# Altium footprint library aeronist-Footprint-Lib.PcbLib: 67 footprints (part 4 of 5)
Each footprint in its own frame and in the unit in brackets; x right, y up, seen from the top. Pads: shape width x height; smd on the part's side, far side on the other; paste and mask are expansions set on the pad; w line width, h text height; cw(c..) or ccw(c..) is an arc to the next point about the centre after c.
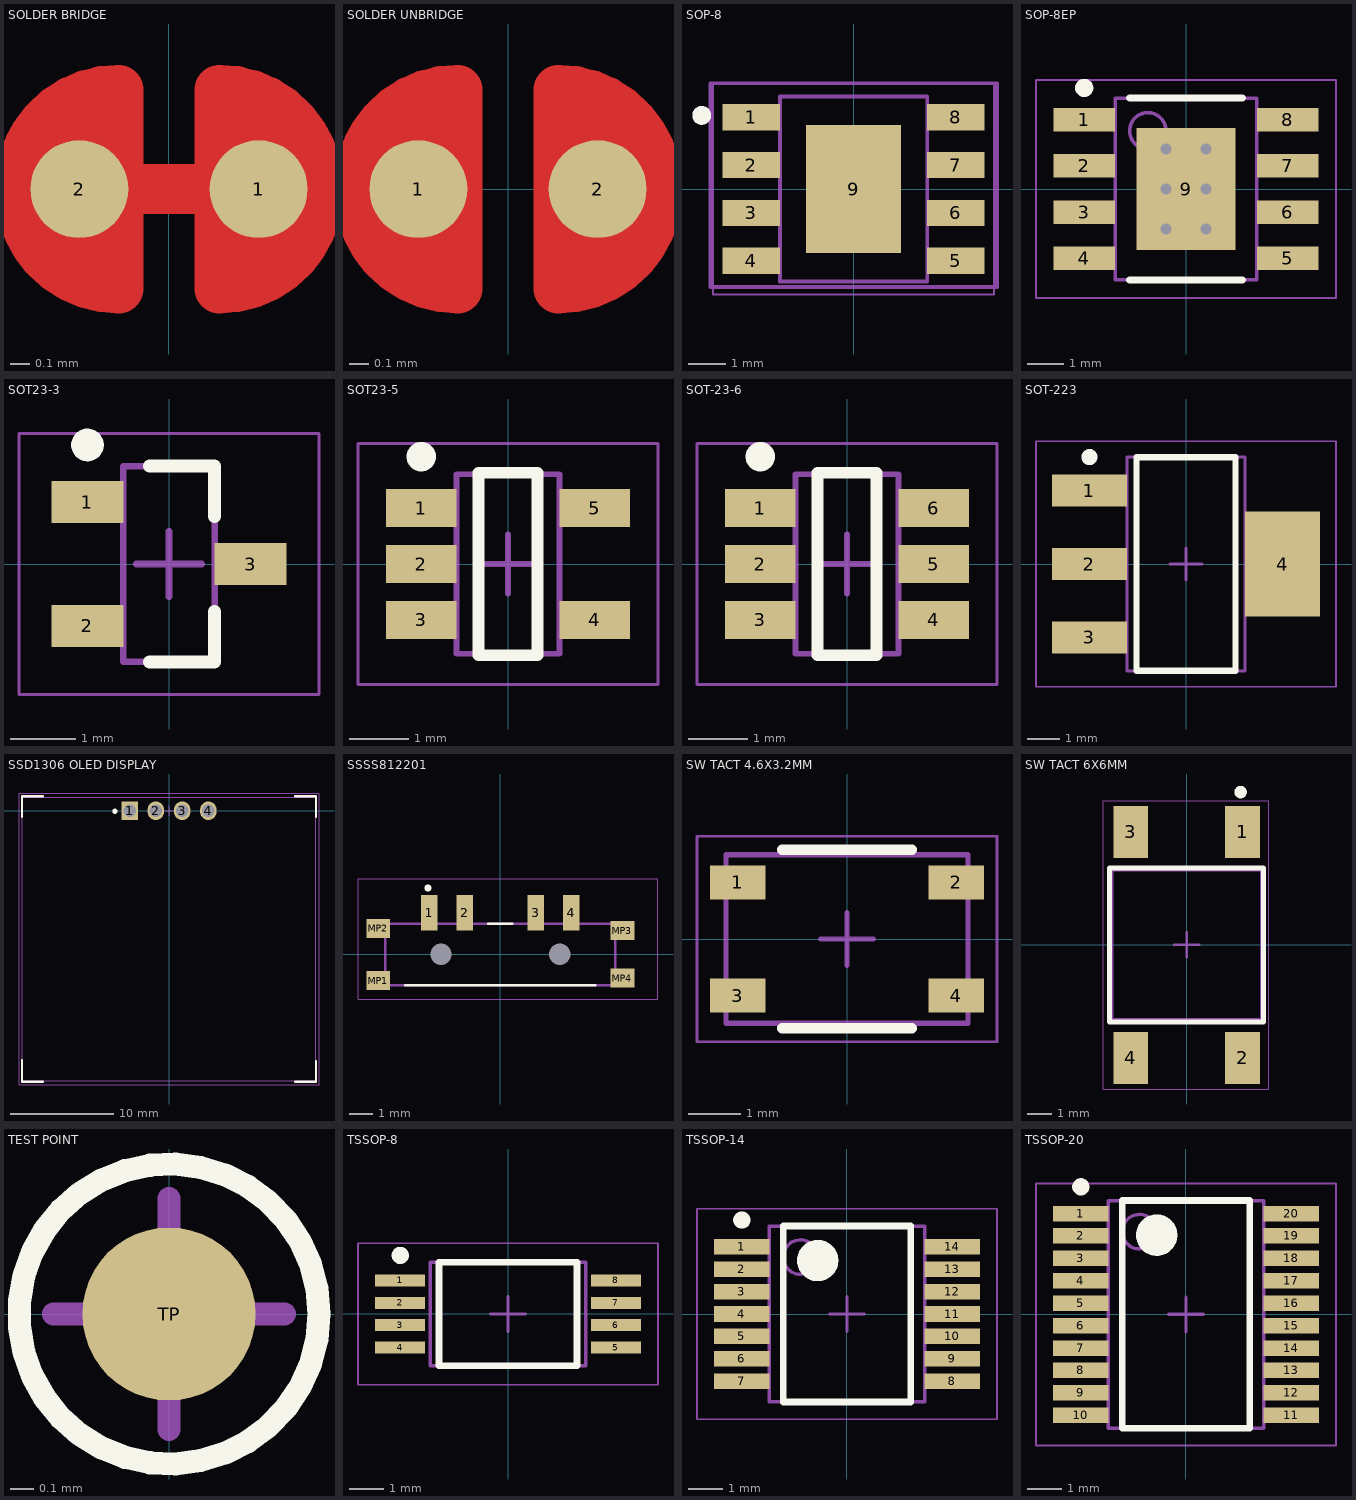
[diagram p3: the footprints below, top view; thin cyan lines are the x and y axes]

## SOLDER BRIDGE [mm] "Bridged PCB jumper footprint"
pads (2):
  round 0.5 smd mask+0: 1(0.458,0) 2(-0.458,0)
Top Layer:
  region: 0.258,0.5 0.45,0.5 0.758,0.25 0.758,-0.2 0.45,-0.508 0.258,-0.508
  region: -0.258,-0.504 -0.45,-0.504 -0.758,-0.254 -0.758,0.196 -0.45,0.504 -0.258,0.504
  lines w0.254: -0.458,0 0.458,0 ; -0.258,-0.508 cw(c-0.258,0) -0.258,0.508 -0.258,-0.508 ; 0.258,-0.508 ccw(c0.258,0) 0.258,0.508 0.258,-0.508
Top Solder:
  circle w0.737: c0.258,0 r0.279
  circle w0.737: c-0.258,0 r0.279
  lines w0.254: -0.279,-0.521 0.233,-0.521 ; -0.262,0.522 0.25,0.522

## SOLDER UNBRIDGE [mm] "Unbridged PCB jumper footprint"
pads (2):
  round 0.5 smd mask+0: 1(-0.458,0) 2(0.458,0)
Top Layer:
  region: -0.258,-0.504 -0.45,-0.504 -0.758,-0.254 -0.758,0.196 -0.45,0.504 -0.258,0.504
  region: 0.258,0.5 0.45,0.5 0.758,0.25 0.758,-0.2 0.45,-0.508 0.258,-0.508
  lines w0.254: -0.258,-0.508 cw(c-0.258,0) -0.258,0.508 -0.258,-0.508 ; 0.258,-0.508 ccw(c0.258,0) 0.258,0.508 0.258,-0.508
Top Solder:
  circle w0.737: c-0.258,0 r0.279
  circle w0.737: c0.258,0 r0.279
  lines w0.254: -0.279,-0.521 0.233,-0.521 ; -0.262,0.522 0.25,0.522

## SOP-8 [mm] "SOP-8, 8-Leads, Body 4.90x3.90mm, Pitch 1.27mm, IPC Low Density."
pads (9):
  rect 1.525x0.7 smd: 1(-2.712,1.905) 2(-2.712,0.635) 3(-2.712,-0.635) 4(-2.712,-1.905) 5(2.712,-1.905) 6(2.712,-0.635) 7(2.712,0.635) 8(2.712,1.905)
  rect 2.513x3.402 smd: 9(0,0)
Top Overlay:
  circle w0.25: c-4.025,1.95 r0.125
Top Assembly:
  lines w0.1: -1.95,-2.45 -1.95,2.45 1.95,2.45 1.95,-2.45 -1.95,-2.45
Top Courtyard:
  lines w0.1: -0.475,0 0.475,0 ; 0,-0.475 0,0.475 ; -3.8,-2.6 -3.8,2.8 3.8,2.8 3.8,-2.6 -3.8,-2.6
Mechanical 20:
  lines w0.05: -3.725,-2.8 3.725,-2.8 3.725,2.8 -3.725,2.8 -3.725,-2.8
3D body "SOP-8.stp": height 1.75, standoff 0, extent -3,-2.4 3,2.5

## SOP-8EP [mm] "SOP-8EP, 8-Leads, Body 4,90x3,85mm, Pitch 1,27mm, Thermal Pad 3,35x2,71mm, IPC Low Density"
height 1.5
pads (9):
  rect 1.7x0.65 smd: 1(-2.8,1.905) 2(-2.8,0.635) 3(-2.8,-0.635) 4(-2.8,-1.905) 5(2.8,-1.905) 6(2.8,-0.635) 7(2.8,0.635) 8(2.8,1.905)
  rect 2.71x3.35 smd: 9(0,0)
via 0.55,-1.1 diameter 0.6 hole 0.3
via -0.55,-1.1 diameter 0.6 hole 0.3
via 0.55,0 diameter 0.6 hole 0.3
via -0.55,0 diameter 0.6 hole 0.3
via 0.55,1.1 diameter 0.6 hole 0.3
via -0.55,1.1 diameter 0.6 hole 0.3
Top Overlay:
  circle w0.25: c-2.8,2.78 r0.125
  lines w0.2: -1.55,-2.5 1.55,-2.5 ; -1.55,2.5 1.55,2.5
Top Assembly:
  circle w0.1: c-1.05,1.6 r0.5
  lines w0.1: -1.95,-2.5 1.95,-2.5 1.95,2.5 -1.95,2.5 -1.95,-2.5
Top Courtyard:
  lines w0.05: -4.125,-3 4.125,-3 4.125,3 -4.125,3 -4.125,-3
  lines w0.1: -0.5,0 0.5,0 ; 0,-0.5 0,0.5
3D body "SOP-8EP.step": height 1.5, standoff 0, extent -3,-2.5 3,2.5

## SOT23-3 [mm] "SOT23, 3-Leads, Body 2,90x2,30mm, Pitch 0,95mm, IPC Low Density"
height 1.1
pads (3):
  rect 1.1x0.65 smd: 1(-1.25,0.95) 2(-1.25,-0.95) 3(1.25,0)
Top Overlay:
  circle w0.25: c-1.25,1.825 r0.125
  lines w0.2: -0.3,-1.5 0.7,-1.5 0.7,-0.725 ; -0.3,1.5 0.7,1.5 0.7,0.725
Top Assembly:
  lines w0.1: -0.7,-1.5 -0.7,1.5 0.7,1.5 0.7,-1.5 -0.7,-1.5
Top Courtyard:
  lines w0.05: -2.3,-2 -2.3,2 2.3,2 2.3,-2 -2.3,-2
  lines w0.1: -0.5,0 0.5,0 ; 0,-0.5 0,0.5
3D body "SOT23-3.step": height 1.1, standoff 0, extent -1.3,-1.5 1.3,1.5

## SOT23-5 [mm] "SOT23, 5-Leads, Body 2,90x2,80mm, Pitch 0,95mm, IPC Low Density"
height 1.45
pads (5):
  rect 1.2x0.65 smd: 1(-1.475,0.95) 2(-1.475,0) 3(-1.475,-0.95) 4(1.475,-0.95) 5(1.475,0.95)
Top Overlay:
  circle w0.25: c-1.475,1.825 r0.125
  lines w0.2: -0.5,-1.55 -0.5,1.55 0.5,1.55 0.5,-1.55 -0.5,-1.55
Top Assembly:
  lines w0.1: -0.875,-1.525 0.875,-1.525 0.875,1.525 -0.875,1.525 -0.875,-1.525
Top Courtyard:
  lines w0.05: -2.55,-2.05 2.55,-2.05 2.55,2.05 -2.55,2.05 -2.55,-2.05
  lines w0.1: -0.5,0 0.5,0 ; 0,-0.5 0,0.5
3D body "SOT23-5.step": height 1.45, standoff 0, extent -1.5,-1.525 1.5,1.525

## SOT-23-6 [mm] "SOP-8, 8-Leads, Body 4.90x3.90mm, Pitch 1.27mm, IPC Low Density."
height 1.1
pads (6):
  rect 1.2x0.65 smd: 1(-1.475,0.95) 2(-1.475,0) 3(-1.475,-0.95) 4(1.475,-0.95) 5(1.475,0) 6(1.475,0.95)
Top Overlay:
  circle w0.25: c-1.475,1.825 r0.125
  lines w0.2: -0.5,-1.55 -0.5,1.55 0.5,1.55 0.5,-1.55 -0.5,-1.55
Top Assembly:
  lines w0.1: -0.875,-1.525 0.875,-1.525 0.875,1.525 -0.875,1.525 -0.875,-1.525
Top Courtyard:
  lines w0.05: -2.55,-2.05 2.55,-2.05 2.55,2.05 -2.55,2.05 -2.55,-2.05
  lines w0.1: -0.5,0 0.5,0 ; 0,-0.5 0,0.5
3D body "SOT-23-6.step": height 1.1, standoff 0, extent -1.5,-1.525 1.5,1.525

## SOT-223 [mm] "SOT223, 4-Leads, Body 6,50x7,00mm (avg), Pitch 2,30mm, IPC Low Density"
height 1.8
pads (4):
  rect 2.35x1 smd: 1(-3.025,2.3) 2(-3.025,0) 3(-3.025,-2.3)
  rect 2.35x3.3 smd: 4(3.025,0)
Top Overlay:
  circle w0.25: c-3.025,3.35 r0.125
  lines w0.2: -1.55,-3.35 -1.55,3.35 1.55,3.35 1.55,-3.35 -1.55,-3.35
Top Assembly:
  lines w0.1: -1.85,-3.35 -1.85,3.35 1.85,3.35 1.85,-3.35 -1.85,-3.35
Top Courtyard:
  lines w0.05: -4.7,-3.85 -4.7,3.85 4.7,3.85 4.7,-3.85 -4.7,-3.85
  lines w0.1: -0.5,0 0.5,0 ; 0,-0.5 0,0.5
3D body "SOT-223.step": height 1.8, standoff 0, extent -3.5,-3.35 3.5,3.35

## SSD1306 OLED DISPLAY [mm] "0.96\" 128×64 blue OLED module with SSD1306 controller, I²C interface (4-pin), 3.3–5 V compatible."
pads (4):
  rect 1.6x1.8 hole 1.2: 1(-3.81,0)
  oval 1.6x1.8 hole 1.2: 2(-1.27,0) 3(1.27,0) 4(3.81,0)
Top Overlay:
  circle w0.25: c-5.225,-0.05 r0.125
  lines w0.2: -14.2,-24.1 -14.2,-26.2 -12.2,-26.2 ; -14.2,-0.6 -14.2,1.4 -12.2,1.4 ; 12.2,-26.2 14.2,-26.2 14.2,-24.2 ; 12.2,1.4 14.2,1.4 14.2,-0.6
Top Assembly:
  lines w0.1: -14.2,-26.1 -14.2,1.3 14.2,1.3 14.2,-26.1 -14.2,-26.1
Top Courtyard:
  lines w0.05: -14.5,-26.5 14.5,-26.5 14.5,1.7 -14.5,1.7 -14.5,-26.5
  lines w0.1: -0.5,0 0.5,0 ; 0,-0.5 0,0.5
3D body "Pantalla OLED 0.96'' 128x64.stp": height 5.55, standoff -5.45, extent -14.2,-26.1 14.2,1.3

## SSSS812201 [mm] "Switch, Slide, SPDT (1P2T), 0.1A 12V, Surface Mount, Right Angle (Side Actuated), ALPS SSSS8 Series"
pads (10):
  rect 0.7x1.5 smd: 1(-3,1.75) 2(-1.5,1.75) 3(1.5,1.75) 4(3,1.75)
  round 0.45 hole 0.9 unplated: MH1(-2.5,0) MH2(2.5,0)
  rect 1x0.8 smd: MP1(-5.15,-1.1) MP2(-5.15,1.1) MP3(5.15,1) MP4(5.15,-1)
Top Overlay:
  lines w0.1: -0.65,-1.3 0.65,-1.3 ; -4,-1.3 4,-1.3 -4,-1.3 ; -0.5,1.3 0.5,1.3 -0.5,1.3
  lines w0.2: -3.1,2.8 ccw(c-3.05,2.8) -3,2.8 ; -3.1,2.8 cw(c-3.05,2.8) -3,2.8 ; -3.1,2.8 ccw(c-3.05,2.8) -3,2.8
Top Assembly:
  lines w0.1: -0.65,-1.3 0.65,-1.3 ; -4.85,-1.3 4.85,-1.3 4.85,1.3 -4.85,1.3 -4.85,-1.3
Top Courtyard:
  lines w0.05: -6,-1.9 -6,3.2 6.65,3.2 6.65,-1.9 -6,-1.9
3D body "SSSS812201.stp": height 1.4, standoff -0.5, extent -5.35,-2.8 5.35,2.2

## SW TACT 4.6X3.2MM [mm]
pads (4):
  rect 1.05x0.65 smd: 1(-2.075,1.075) 2(2.075,1.075) 3(-2.075,-1.075) 4(2.075,-1.075)
Top Overlay:
  lines w0.2: -1.23,-1.7 1.23,-1.7 ; -1.23,1.7 1.23,1.7
Top Assembly:
  lines w0.1: -2.3,-1.6 -2.3,1.6 2.3,1.6 2.3,-1.6 -2.3,-1.6
Top Courtyard:
  lines w0.05: -2.85,-1.95 2.85,-1.95 2.85,1.95 -2.85,1.95 -2.85,-1.95
  lines w0.1: -0.5,0 0.5,0 ; 0,-0.5 0,0.5
3D body "SKRPANE010.stp": height 2.5, standoff 0, extent -2.3,-1.6 2.3,1.6

## SW TACT 6X6MM [mm] "6×6 mm SMD tactile switch, 4 pads"
pads (4):
  rect 1.4x2.1 smd: 1(2.25,4.55) 2(2.25,-4.55) 3(-2.25,4.55) 4(-2.25,-4.55)
Top Overlay:
  circle w0.25: c2.175,6.15 r0.125
  lines w0.2: -3.1,-3.1 -3.1,3.1 3.1,3.1 3.1,-3.1 -3.1,-3.1
Top Assembly:
  lines w0.1: -3,-3 3,-3 3,3 -3,3 -3,-3
Top Courtyard:
  lines w0.05: -3.35,-5.8 -3.35,5.8 3.3,5.8 3.3,-5.8 -3.35,-5.8
  lines w0.1: -0.5,0 0.5,0 ; 0,-0.5 0,0.5
3D body "FSM4JSMATR.stp": height 5.13, standoff 0, extent -3,-5 3,5

## TEST POINT [mm] "Test Point, PCB Pad Only, Ø1.2mm"
pads (1):
  round 0.75 smd paste-0.6: TP(0,0)
Top Overlay:
  circle w0.1: c0,0 r0.65
Top Courtyard:
  lines w0.1: -0.5,0 0.5,0 ; 0,-0.5 0,0.5
3D body: height 0.03, standoff 0, extent -0.375,-0.375 0.375,0.375

## TSSOP-8 [mm] "TSSOP, 8-Leads, Body 2,93x4,40mm, Pitch 0,65mm, IPC Low Density"
height 1.2
pads (8):
  rect 1.45x0.35 smd: 1(-3.125,0.975) 2(-3.125,0.325) 3(-3.125,-0.325) 4(-3.125,-0.975) 5(3.125,-0.975) 6(3.125,-0.325) 7(3.125,0.325) 8(3.125,0.975)
Top Overlay:
  circle w0.25: c-3.125,1.7 r0.125
  lines w0.2: -2,-1.5 2,-1.5 2,1.5 -2,1.5 -2,-1.5
Top Assembly:
  lines w0.1: -2.25,-1.5 2.25,-1.5 2.25,1.5 -2.25,1.5 -2.25,-1.5
Top Courtyard:
  lines w0.05: -4.35,-2.05 4.35,-2.05 4.35,2.05 -4.35,2.05 -4.35,-2.05
  lines w0.1: -0.5,0 0.5,0 ; 0,-0.5 0,0.5
3D body "TSSOP-8.STEP": height 1.2, standoff 0, extent -3.2,-1.465 3.2,1.465

## TSSOP-14 [mm] "TSSOP-14, 14-Leads, Body 5,00x4,40mm, Pitch 0,65mm, IPC Low Density"
height 1.2
pads (14):
  rect 1.6x0.45 smd: 1(-3.05,1.95) 2(-3.05,1.3) 3(-3.05,0.65) 4(-3.05,0) 5(-3.05,-0.65) 6(-3.05,-1.3) 7(-3.05,-1.95) 8(3.05,-1.95) 9(3.05,-1.3) 10(3.05,-0.65) 11(3.05,0) 12(3.05,0.65) 13(3.05,1.3) 14(3.05,1.95)
Top Overlay:
  circle w0.6: c-0.85,1.55 r0.3
  circle w0.25: c-3.05,2.725 r0.125
  lines w0.2: -1.85,-2.55 1.85,-2.55 1.85,2.55 -1.85,2.55 -1.85,-2.55
Top Assembly:
  circle w0.1: c-1.35,1.65 r0.5
  lines w0.1: -2.25,-2.55 2.25,-2.55 2.25,2.55 -2.25,2.55 -2.25,-2.55
Top Courtyard:
  lines w0.05: -4.35,-3.05 4.35,-3.05 4.35,3.05 -4.35,3.05 -4.35,-3.05
  lines w0.1: -0.5,0 0.5,0 ; 0,-0.5 0,0.5
3D body "TSSOP14.step": height 1.2, standoff 0, extent -3.2,-2.55 3.2,2.55

## TSSOP-20 [mm] "TSSOP, 20-Leads, Body 6,50x4,40mm, Pitch 0,65mm, IPC Low Density"
height 1.2
pads (20):
  rect 1.6x0.45 smd: 1(-3.05,2.925) 2(-3.05,2.275) 3(-3.05,1.625) 4(-3.05,0.975) 5(-3.05,0.325) 6(-3.05,-0.325) 7(-3.05,-0.975) 8(-3.05,-1.625) 9(-3.05,-2.275) 10(-3.05,-2.925) 11(3.05,-2.925) 12(3.05,-2.275) 13(3.05,-1.625) 14(3.05,-0.975) 15(3.05,-0.325) 16(3.05,0.325) 17(3.05,0.975) 18(3.05,1.625) 19(3.05,2.275) 20(3.05,2.925)
Top Overlay:
  circle w0.6: c-0.85,2.3 r0.3
  circle w0.25: c-3.05,3.7 r0.125
  lines w0.2: -1.85,-3.3 1.85,-3.3 1.85,3.3 -1.85,3.3 -1.85,-3.3
Top Assembly:
  circle w0.1: c-1.35,2.4 r0.5
  lines w0.1: -2.25,-3.3 2.25,-3.3 2.25,3.3 -2.25,3.3 -2.25,-3.3
Top Courtyard:
  lines w0.05: -4.35,-3.8 4.35,-3.8 4.35,3.8 -4.35,3.8 -4.35,-3.8
  lines w0.1: -0.5,0 0.5,0 ; 0,-0.5 0,0.5
3D body "TSSOP20.step": height 1.2, standoff 0, extent -3.2,-3.3 3.2,3.3